# Altium footprint library RF Module.PcbLib: 29 footprints (part 2 of 2)
Each footprint in its own frame and in the unit in brackets; x right, y up, seen from the top. Pads: shape width x height; smd on the part's side, far side on the other; paste and mask are expansions set on the pad; w line width, h text height; cw(c..) or ccw(c..) is an arc to the next point about the centre after c.
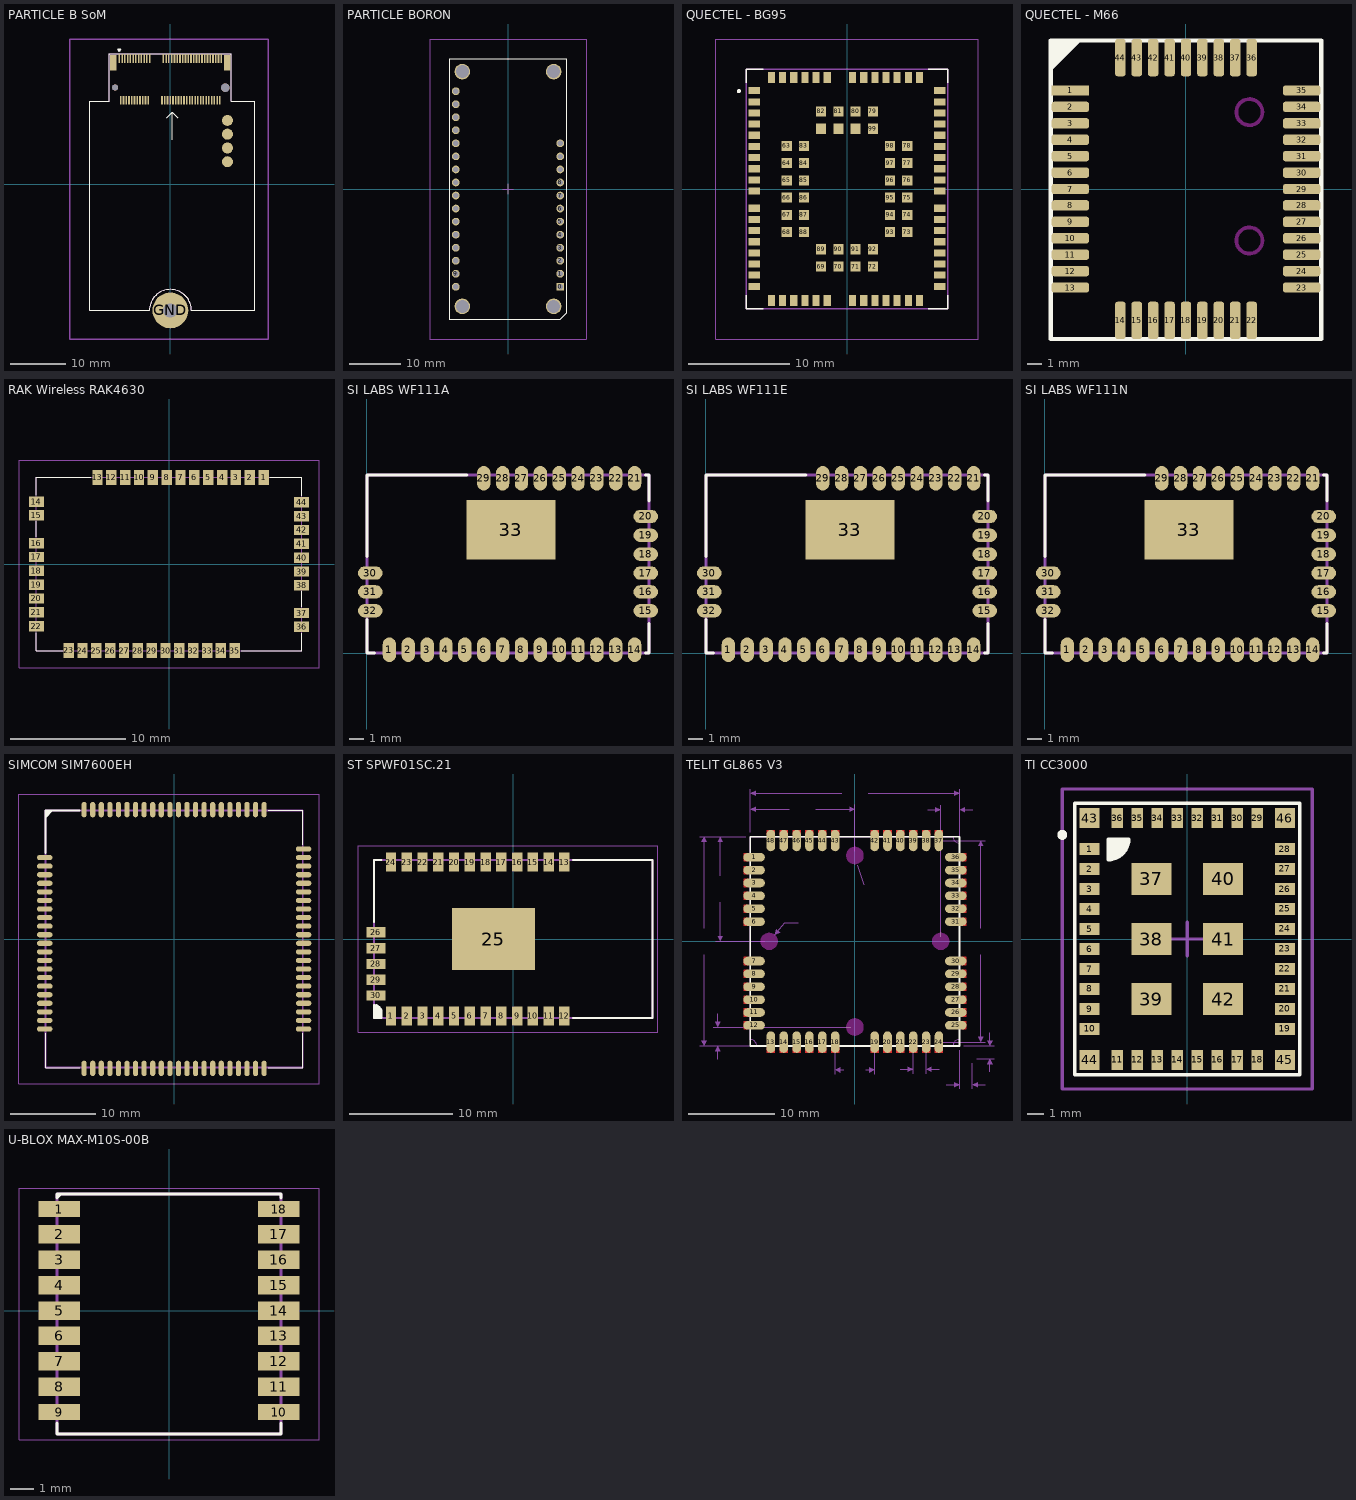
[diagram p1: the footprints below, top view; thin cyan lines are the x and y axes]

## PARTICLE B SoM [mm]
pads (76):
  rect 0.3x1.55 smd: 1(-9.26,22.867) 2(-9.01,15.317) 3(-8.76,22.867) 4(-8.51,15.317) 5(-8.26,22.867) 6(-8.01,15.317) 7(-7.76,22.867) 8(-7.51,15.317) 9(-7.26,22.867) 10(-7.01,15.317) 11(-6.76,22.867) 12(-6.51,15.317) 13(-6.26,22.867) 14(-6.01,15.317) 15(-5.76,22.867) 16(-5.51,15.317) 17(-5.26,22.867) 18(-5.01,15.317) 19(-4.76,22.867) 20(-4.51,15.317) 21(-4.26,22.867) 22(-4.01,15.317) 23(-3.76,22.867) 32(-1.51,15.317) 33(-1.26,22.867) 34(-1.01,15.317) 35(-0.76,22.867) 36(-0.51,15.317) 37(-0.26,22.867) 38(-0.01,15.317) 39(0.24,22.867) 40(0.49,15.317) 41(0.74,22.867) 42(0.99,15.317) 43(1.24,22.867) 44(1.49,15.317) 45(1.74,22.867) 46(1.99,15.317) 47(2.24,22.867) 48(2.49,15.317) 49(2.74,22.867) 50(2.99,15.317) 51(3.24,22.867) 52(3.49,15.317) 53(3.74,22.867) 54(3.99,15.317) 55(4.24,22.867) 56(4.49,15.317) 57(4.74,22.867) 58(4.99,15.317) 59(5.24,22.867) 60(5.49,15.317) 61(5.74,22.867) 62(5.99,15.317) 63(6.24,22.867) 64(6.49,15.317) 65(6.74,22.867) 66(6.99,15.317) 67(7.24,22.867) 68(7.49,15.317) 69(7.74,22.867) 70(7.99,15.317) 71(8.24,22.867) 72(8.49,15.317) 73(8.74,22.867) 74(8.99,15.317) 75(9.24,22.867)
  rect 1.2x2.75 smd: 76(10.34,22.093) 77(-10.36,22.093)
  rrect100% 2x2 smd: !RESET(10.36,11.632) SWCLK(10.36,4.132) SWDIO(10.36,6.632) SWO(10.36,9.132)
  round 6.5 hole 2.6: GND(0.009,-22.867)
  round 1.1 hole 1.1 unplated: MH1(-10.01,17.592)
  round 1.55 hole 1.55 unplated: MH2(9.99,17.592)
Top Overlay:
  lines w0.127: -0.64,12.132 0.36,13.132 ; 0.36,8.132 0.36,13.132 ; 1.36,12.132 0.36,13.132 ; -14.64,-22.867 -14.64,15.132 -11.091,15.132 -11.091,23.767 11.058,23.767 11.058,15.132 15.36,15.132 15.36,-22.867 3.819,-22.867 ccw(c0.009,-22.867) -3.801,-22.867 -14.64,-22.867
  lines w0.254: -9.589,24.561 -8.989,24.561 -9.289,24.161 -9.589,24.561
Top Paste:
  circle w0: c0.009,-22.867 r3.127
Top Component Outline:
  lines w0.127: -14.64,-22.867 -3.801,-22.867 cw(c0.009,-22.867) 3.819,-22.867 15.36,-22.867 15.36,15.132 11.058,15.132 11.058,23.764 -11.091,23.764 -11.091,15.132 -14.64,15.132 -14.64,-22.867
Top Courtyard:
  lines w0.254: -18.279,-28.048 -18.279,26.409 17.789,26.409 17.789,-28.048 -18.279,-28.048
3D body "TE 2199230-4.stp": height 4.09, standoff -0.61, extent -10.941,14.781 10.959,23.481
3D body "JAE SM3ZS067U410.step": height 3.1, standoff -0.7, extent -2.222,-25.115 2.254,-20.615

## PARTICLE BORON [mm]
pads (32):
  rect 1.5x1.5 hole 1.02: 0(10.16,-19.05)
  round 1.5 hole 1.02: 1(10.16,-16.51) 2(10.16,-13.97) 3(10.16,-11.43) 3v3(-10.16,16.51) 4(10.16,-8.89) 5(10.16,-6.35) 6(10.16,-3.81) 7(10.16,-1.27) 8(10.16,1.27) 9(-10.16,-16.51) 10(-10.16,-13.97) 11(-10.16,-11.43) 12(-10.16,-8.89) 13(-10.16,-6.35) 14(-10.16,-3.81) 15(-10.16,-1.27) 16(-10.16,1.27) 17(-10.16,3.81) 18(-10.16,6.35) 19(-10.16,8.89) 20(-10.16,13.97) EN(10.16,6.35) GND(-10.16,11.43) LiPo+(10.16,8.89) N.C.(-10.16,-19.05) RST(-10.16,19.05) VBUS(10.16,3.81)
  round 3.048 hole 2.54: ""(-8.89,-22.86) ""(-8.89,22.86) ""(8.89,-22.86) ""(8.89,22.86)
Top Overlay:
  lines w0.2: -11.43,-25.4 -11.43,25.4 11.43,25.4 11.43,-24.13 10.16,-25.4 -11.43,-25.4
Top Courtyard:
  lines w0.2: -1,0 1,0 ; 0,-1 0,1 ; -15.24,-29.21 -15.24,29.21 15.24,29.21 15.24,-29.21 -15.24,-29.21

## QUECTEL - BG95 [mm]
pads (102):
  rect 1.1x0.7 smd paste-2: 1(-9.15,9.7) 2(-9.15,8.6) 3(-9.15,7.5) 4(-9.15,6.4) 5(-9.15,5.3) 6(-9.15,4.2) 7(-9.15,3.1) 8(-9.15,2) 9(-9.15,0.9) 10(-9.15,-0.2) 11(-9.15,-1.9) 12(-9.15,-3) 13(-9.15,-4.1) 14(-9.15,-5.2) 15(-9.15,-6.3) 16(-9.15,-7.4) 17(-9.15,-8.5) 18(-9.15,-9.6) 32(9.15,-9.6) 33(9.15,-8.5) 34(9.15,-7.4) 35(9.15,-6.3) 36(9.15,-5.2) 37(9.15,-4.1) 38(9.15,-3) 39(9.15,-1.9) 40(9.15,-0.2) 41(9.15,0.9) 42(9.15,2) 43(9.15,3.1) 44(9.15,4.2) 45(9.15,5.3) 46(9.15,6.4) 47(9.15,7.5) 48(9.15,8.6) 49(9.15,9.7)
  rect 0.7x1.1 smd paste-2: 19(-7.45,-11) 20(-6.35,-11) 21(-5.25,-11) 22(-4.15,-11) 23(-3.05,-11) 24(-1.95,-11) 25(0.55,-11) 26(1.65,-11) 27(2.75,-11) 28(3.85,-11) 29(4.95,-11) 30(6.05,-11) 31(7.15,-11) 50(7.15,11) 51(6.05,11) 52(4.95,11) 53(3.85,11) 54(2.75,11) 55(1.65,11) 56(0.55,11) 57(-1.95,11) 58(-3.05,11) 59(-4.15,11) 60(-5.25,11) 61(-6.35,11) 62(-7.45,11)
  rect 1x1 smd paste-1: 63(-5.95,4.25) 64(-5.95,2.55) 65(-5.95,0.85) 66(-5.95,-0.85) 67(-5.95,-2.55) 68(-5.95,-4.25) 69(-2.55,-7.65) 70(-0.85,-7.65) 71(0.85,-7.65) 72(2.55,-7.65) 73(5.95,-4.25) 74(5.95,-2.55) 75(5.95,-0.85) 76(5.95,0.85) 77(5.95,2.55) 78(5.95,4.25) 79(2.55,7.65) 80(0.85,7.65) 81(-0.85,7.65) 82(-2.55,7.65) 83(-4.25,4.25) 84(-4.25,2.55) 85(-4.25,0.85) 86(-4.25,-0.85) 87(-4.25,-2.55) 88(-4.25,-4.25) 89(-2.55,-5.95) 90(-0.85,-5.95) 91(0.85,-5.95) 92(2.55,-5.95) 93(4.25,-4.25) 94(4.25,-2.55) 95(4.25,-0.85) 96(4.25,0.85) 97(4.25,2.55) 98(4.25,4.25) 99(2.55,5.95) 100(0.85,5.95) 101(-0.85,5.95) 102(-2.55,5.95)
Top Overlay:
  circle w0.2: c-10.67,9.66 r0.1
  lines w0.127: -9.95,-10.5 -9.95,-11.8 -8.25,-11.8 ; -9.95,10.5 -9.95,11.8 -8.25,11.8 ; 8,-11.8 9.95,-11.8 9.95,-10.5 ; 8,11.8 9.95,11.8 9.95,10.5
Top Paste:
  drawing of 102 lines, arcs and shapes, not listed
Top Component Outline:
  circle w0.2: c-10.67,9.66 r0.1
  lines w0.127: -9.95,-11.8 9.95,-11.8 9.95,11.8 -9.95,11.8 -9.95,-11.8
Top Courtyard:
  lines w0.05: -12.95,-14.8 -12.95,14.8 12.95,14.8 12.95,-14.8 -12.95,-14.8
3D body "step_temp.STEP": height 2.4, standoff 0, extent -9.95,-11.8 9.95,11.8

## QUECTEL - M66 [mm]
height 2.3
pads (44):
  rect 2.5x0.7 smd: 1(-7.75,6.6)
  rrect50% 2.5x0.7 smd: 2(-7.75,5.5) 3(-7.75,4.4) 4(-7.75,3.3) 5(-7.75,2.2) 6(-7.75,1.1) 7(-7.75,0) 8(-7.75,-1.1) 9(-7.75,-2.2) 10(-7.75,-3.3) 11(-7.75,-4.4) 12(-7.75,-5.5) 13(-7.75,-6.6) 23(7.75,-6.6) 24(7.75,-5.5) 25(7.75,-4.4) 26(7.75,-3.3) 27(7.75,-2.2) 28(7.75,-1.1) 29(7.75,0) 30(7.75,1.1) 31(7.75,2.2) 32(7.75,3.3) 33(7.75,4.4) 34(7.75,5.5) 35(7.75,6.6)
  rrect50% 0.7x2.5 smd: 14(-4.4,-8.8) 15(-3.3,-8.8) 16(-2.2,-8.8) 17(-1.1,-8.8) 18(0,-8.8) 19(1.1,-8.8) 20(2.2,-8.8) 21(3.3,-8.8) 22(4.4,-8.8) 36(4.4,8.8) 37(3.3,8.8) 38(2.2,8.8) 39(1.1,8.8) 40(0,8.8) 41(-1.1,8.8) 42(-2.2,8.8) 43(-3.3,8.8) 44(-4.4,8.8)
Top Overlay:
  region: -9.05,9.95 -9.05,7.9 -7,9.95
  lines w0.3: -9.05,-10.05 -9.05,9.95 9.05,9.95 9.05,-10.05 -9.05,-10.05 ; -9.05,7.9 -9.05,7.9
Keep-Out Layer:
  circle w0.254: c4.25,5.15 r0.875
  circle w0.254: c4.25,-3.45 r0.875
3D body "User Library-Quecte_M66.step": height 2.3, standoff 0, extent -7.9,-8.8 7.9,8.9

## RAK Wireless RAK4630 [mm] "RAK4630 Module"
height 3
pads (44):
  rect 0.9x1.3 smd: 1(8.2,7.5) 2(7,7.5) 3(5.8,7.5) 4(4.6,7.5) 5(3.4,7.5) 6(2.2,7.5) 7(1,7.5) 8(-0.2,7.5) 9(-1.4,7.5) 10(-2.6,7.5) 11(-3.8,7.5) 12(-5,7.5) 13(-6.2,7.5) 23(-8.7,-7.496) 24(-7.5,-7.5) 25(-6.3,-7.5) 26(-5.1,-7.5) 27(-3.9,-7.5) 28(-2.7,-7.5) 29(-1.5,-7.5) 30(-0.3,-7.5) 31(0.9,-7.5) 32(2.1,-7.5) 33(3.3,-7.5) 34(4.5,-7.5) 35(5.7,-7.5)
  rect 1.3x0.9 smd: 14(-11.5,5.41) 15(-11.5,4.21) 16(-11.5,1.81) 17(-11.5,0.61) 18(-11.5,-0.59) 19(-11.5,-1.79) 20(-11.5,-2.99) 21(-11.5,-4.19) 22(-11.5,-5.39) 36(11.5,-5.45) 37(11.5,-4.25) 38(11.5,-1.85) 39(11.5,-0.65) 40(11.5,0.55) 41(11.5,1.75) 42(11.5,2.95) 43(11.5,4.15) 44(11.5,5.35)
Top Overlay:
  lines w0.1: -11.5,-5.95 -11.5,-7.5 -9.225,-7.5 ; -11.5,2.375 -11.5,3.7 ; -11.5,5.975 -11.5,7.5 -6.775,7.5 ; 6.25,-7.5 11.5,-7.5 11.5,-6 ; 8.75,7.5 11.5,7.5 11.5,5.9 ; 11.5,-3.7 11.5,-2.375
Board:
  lines w0.1: -11.5,-7.5 -11.5,7.5 11.5,7.5 11.5,-7.5 -11.5,-7.5
Top Dimensions (Mech11):
  lines w0.1: -13,-9 -13,9 13,9 13,-9 -13,-9
3D body "RAK4630.stp": height 3, standoff 0, extent -11.5,-7.5 11.5,7.5

## SI LABS WF111A [mm]
height 2.1
pads (33):
  oval 0.9x1.65 smd: 1(1.515,0.225) 2(2.785,0.225) 3(4.055,0.225) 4(5.325,0.225) 5(6.595,0.225) 6(7.865,0.225) 7(9.135,0.225) 8(10.405,0.225) 9(11.675,0.225) 10(12.945,0.225) 11(14.215,0.225) 12(15.485,0.225) 13(16.755,0.225) 14(18.025,0.225) 21(18.025,11.775) 22(16.755,11.775) 23(15.485,11.775) 24(14.215,11.775) 25(12.945,11.775) 26(11.675,11.775) 27(10.405,11.775) 28(9.135,11.775) 29(7.865,11.775)
  oval 1.65x0.9 smd: 15(18.775,2.85) 16(18.775,4.12) 17(18.775,5.39) 18(18.775,6.66) 19(18.775,7.93) 20(18.775,9.2) 30(0.225,5.39) 31(0.225,4.12) 32(0.225,2.85)
  rect 6x4 smd: 33(9.7,8.3)
Top Overlay:
  lines w0.2: 0,2.25 0,0 0.5,0 ; 0,6.5 0,12 6.75,12 ; 18.75,0 19,0 19,2 ; 18.75,12 19,12 19,10.25
Board:
  lines w0.2: 0,0 0,12 19,12 19,0 0,0
3D body "WF111A.STEP": height 2.1, standoff 0, extent 0,0 19,12

## SI LABS WF111E [mm]
height 2.1
pads (33):
  oval 0.9x1.65 smd: 1(1.515,0.225) 2(2.785,0.225) 3(4.055,0.225) 4(5.325,0.225) 5(6.595,0.225) 6(7.865,0.225) 7(9.135,0.225) 8(10.405,0.225) 9(11.675,0.225) 10(12.945,0.225) 11(14.215,0.225) 12(15.485,0.225) 13(16.755,0.225) 14(18.025,0.225) 21(18.025,11.775) 22(16.755,11.775) 23(15.485,11.775) 24(14.215,11.775) 25(12.945,11.775) 26(11.675,11.775) 27(10.405,11.775) 28(9.135,11.775) 29(7.865,11.775)
  oval 1.65x0.9 smd: 15(18.775,2.85) 16(18.775,4.12) 17(18.775,5.39) 18(18.775,6.66) 19(18.775,7.93) 20(18.775,9.2) 30(0.225,5.39) 31(0.225,4.12) 32(0.225,2.85)
  rect 6x4 smd: 33(9.7,8.3)
Top Overlay:
  lines w0.2: 0,2.25 0,0 0.5,0 ; 0,6.5 0,12 6.75,12 ; 18.75,0 19,0 19,2 ; 18.75,12 19,12 19,10.25
Board:
  lines w0.2: 0,0 19,0 19,12 0,12 0,0
3D body "WF111E.STEP": height 2.2, standoff 0, extent 0,0 19,12

## SI LABS WF111N [mm]
height 2.1
pads (33):
  oval 0.9x1.65 smd: 1(1.515,0.225) 2(2.785,0.225) 3(4.055,0.225) 4(5.325,0.225) 5(6.595,0.225) 6(7.865,0.225) 7(9.135,0.225) 8(10.405,0.225) 9(11.675,0.225) 10(12.945,0.225) 11(14.215,0.225) 12(15.485,0.225) 13(16.755,0.225) 14(18.025,0.225) 21(18.025,11.775) 22(16.755,11.775) 23(15.485,11.775) 24(14.215,11.775) 25(12.945,11.775) 26(11.675,11.775) 27(10.405,11.775) 28(9.135,11.775) 29(7.865,11.775)
  oval 1.65x0.9 smd: 15(18.775,2.85) 16(18.775,4.12) 17(18.775,5.39) 18(18.775,6.66) 19(18.775,7.93) 20(18.775,9.2) 30(0.225,5.39) 31(0.225,4.12) 32(0.225,2.85)
  rect 6x4 smd: 33(9.7,8.3)
Top Overlay:
  lines w0.2: 0,2.25 0,0 0.5,0 ; 0,6.5 0,12 6.75,12 ; 18.75,0 19,0 19,2 ; 18.75,12 19,12 19,10.25
Board:
  lines w0.2: 0,0 0,12 19,12 19,0 0,0
3D body "WF111N.STEP": height 2.1, standoff 0, extent 0,0 19,12

## SIMCOM SIM7600EH [mm]
pads (87):
  rrect100% 1.8x0.6 smd: 1(-15.1,9.5) 2(-15.1,8.5) 3(-15.1,7.5) 4(-15.1,6.5) 5(-15.1,5.5) 6(-15.1,4.5) 7(-15.1,3.5) 8(-15.1,2.5) 9(-15.1,1.5) 10(-15.1,0.5) 11(-15.1,-0.5) 12(-15.1,-1.5) 13(-15.1,-2.5) 14(-15.1,-3.5) 15(-15.1,-4.5) 16(-15.1,-5.5) 17(-15.1,-6.5) 18(-15.1,-7.5) 19(-15.1,-8.5) 20(-15.1,-9.5) 41(15.1,-9.5) 42(15.1,-8.5) 43(15.1,-7.5) 44(15.1,-6.5) 45(15.1,-5.5) 46(15.1,-4.5) 47(15.1,-3.5) 48(15.1,-2.5) 49(15.1,-1.5) 50(15.1,-0.5) 51(15.1,0.5) 52(15.1,1.5) 53(15.1,2.5) 54(15.1,3.5) 55(15.1,4.5) 56(15.1,5.5) 57(15.1,6.5) 58(15.1,7.5) 59(15.1,8.5) 60(15.1,9.5) 81(-15.1,-10.5) 82(15.1,-10.5) 85(15.1,10.5)
  rrect100% 0.6x1.8 smd: 21(-9.5,-15.1) 22(-8.5,-15.1) 23(-7.5,-15.1) 24(-6.5,-15.1) 25(-5.5,-15.1) 26(-4.5,-15.1) 27(-3.5,-15.1) 28(-2.5,-15.1) 29(-1.5,-15.1) 30(-0.5,-15.1) 31(0.5,-15.1) 32(1.5,-15.1) 33(2.5,-15.1) 34(3.5,-15.1) 35(4.5,-15.1) 36(5.5,-15.1) 37(6.5,-15.1) 38(7.5,-15.1) 39(8.5,-15.1) 40(9.5,-15.1) 61(9.5,15.1) 62(8.5,15.1) 63(7.5,15.1) 64(6.5,15.1) 65(5.5,15.1) 66(4.5,15.1) 67(3.5,15.1) 68(2.5,15.1) 69(1.5,15.1) 70(0.5,15.1) 71(-0.5,15.1) 72(-1.5,15.1) 73(-2.5,15.1) 74(-3.5,15.1) 75(-4.5,15.1) 76(-5.5,15.1) 77(-6.5,15.1) 78(-7.5,15.1) 79(-8.5,15.1) 80(-9.5,15.1) 83(10.5,-15.1) 84(-10.5,-15.1) 86(-10.5,15.1) 87(10.5,15.1)
Top Overlay:
  lines w0.1: -15,-11 -15,-15 -11,-15 ; 11,-15 15,-15 15,-11 ; 11,15 15,15 15,11
  lines w0.2: -15,10 -15,15 -11,15 ; -15,14.224 -14.224,15 ; -15,14.35 -14.35,15 ; -15,14.5 -14.5,15 ; -15,14.7 -14.7,15 -15,14.725
Top Component Outline:
  lines w0.2: -15,-15 15,-15 15,15 -15,15 -15,-15
Top Courtyard:
  lines w0.1: -18.1,-16.9 16.9,-16.9 16.9,16.9 -18.1,16.9 -18.1,-16.9
3D body "SIM7600EH.stp": height 2.92, standoff 0.02, extent -15,-15 15,15

## ST SPWF01SC.21 [mm] "Serial to WiFi b/g/n intelligent modules"
height 2.35
pads (30):
  rect 1x1.85 smd: 1(-11.811,-7.435) 2(-10.287,-7.435) 3(-8.763,-7.435) 4(-7.239,-7.435) 5(-5.715,-7.435) 6(-4.191,-7.435) 7(-2.667,-7.435) 8(-1.143,-7.435) 9(0.381,-7.435) 10(1.905,-7.435) 11(3.429,-7.435) 12(4.953,-7.435) 13(4.953,7.435) 14(3.429,7.435) 15(1.905,7.435) 16(0.381,7.435) 17(-1.143,7.435) 18(-2.667,7.435) 19(-4.191,7.435) 20(-5.715,7.435) 21(-7.239,7.435) 22(-8.763,7.435) 23(-10.287,7.435) 24(-11.811,7.435)
  rect 8x6 smd: 25(-1.911,0)
  rect 1.85x1 smd: 26(-13.277,0.636) 27(-13.277,-0.888) 28(-13.277,-2.412) 29(-13.277,-3.936) 30(-13.277,-5.46)
Top Overlay:
  region: -13.462,-7.62 -13.462,-6.37 -13.13,-6.37 -12.712,-6.788 -12.712,-7.62
  lines w0.2: -13.462,1.63 -13.462,7.62 -12.712,7.62 ; 5.788,-7.62 13.462,-7.62 13.462,7.62 5.788,7.62 ; -13.462,-7.62 -13.462,-6.37 cw(c-13.462,-7.12) -12.712,-7.12 -12.712,-7.62 -13.462,-7.62
Board:
  lines w0.2: -13.462,-7.62 -13.462,7.62 13.462,7.62 13.462,-7.62 -13.462,-7.62
Top Courtyard:
  lines w0.1: -1,0 1,0 ; 0,-1 0,1 ; -15,-9 14,-9 14,9 -15,9 -15,-9
3D body "SPWF01SC.21.STEP": height 2.6, standoff -0.03, extent -13.462,-7.62 13.462,7.62

## TELIT GL865 V3 [mm] "Telit GL865 Gsm/GPRS Module"
height 2.6
pads (48):
  oval 2.5x1 smd paste+0 mask+0.05: 1(-11.75,9.8) 2(-11.75,8.3) 3(-11.75,6.8) 4(-11.75,5.3) 5(-11.75,3.8) 6(-11.75,2.3) 7(-11.75,-2.3) 8(-11.75,-3.8) 9(-11.75,-5.3) 10(-11.75,-6.8) 11(-11.75,-8.3) 12(-11.75,-9.8) 25(11.75,-9.8) 26(11.75,-8.3) 27(11.75,-6.8) 28(11.75,-5.3) 29(11.75,-3.8) 30(11.75,-2.3) 31(11.75,2.3) 32(11.75,3.8) 33(11.75,5.3) 34(11.75,6.8) 35(11.75,8.3) 36(11.75,9.8)
  oval 1x2.5 smd paste+0 mask+0.05: 13(-9.8,-11.75) 14(-8.3,-11.75) 15(-6.8,-11.75) 16(-5.3,-11.75) 17(-3.8,-11.75) 18(-2.3,-11.75) 19(2.3,-11.75) 20(3.8,-11.75) 21(5.3,-11.75) 22(6.8,-11.75) 23(8.3,-11.75) 24(9.8,-11.75) 37(9.8,11.75) 38(8.3,11.75) 39(6.8,11.75) 40(5.3,11.75) 41(3.8,11.75) 42(2.3,11.75) 43(-2.3,11.75) 44(-3.8,11.75) 45(-5.3,11.75) 46(-6.8,11.75) 47(-8.3,11.75) 48(-9.8,11.75)
Top Layer:
  rectangle: 1.8,-13 2.8,-12.375
  rectangle: 4.8,-13 5.8,-12.375
  rectangle: 7.8,-13 8.8,-12.375
  rectangle: 9.3,-13 10.3,-12.375
  rectangle: 6.3,-13 7.3,-12.375
  rectangle: 3.3,-13 4.3,-12.375
  rectangle: -10.3,-13 -9.3,-12.375
  rectangle: -7.3,-13 -6.3,-12.375
  rectangle: -4.3,-13 -3.3,-12.375
  rectangle: -2.8,-13 -1.8,-12.375
  rectangle: -5.8,-13 -4.8,-12.375
  rectangle: -8.8,-13 -7.8,-12.375
  rectangle: 1.8,12.375 2.8,13
  rectangle: 4.8,12.375 5.8,13
  rectangle: 7.8,12.375 8.8,13
  rectangle: 9.3,12.375 10.3,13
  rectangle: 6.3,12.375 7.3,13
  rectangle: 3.3,12.375 4.3,13
  rectangle: -8.8,12.375 -7.8,13
  rectangle: -5.8,12.375 -4.8,13
  rectangle: -2.8,12.375 -1.8,13
  rectangle: -4.3,12.375 -3.3,13
  rectangle: -7.3,12.375 -6.3,13
  rectangle: -10.3,12.375 -9.3,13
  rectangle: 12.5,-2.8 13,-1.8
  rectangle: 12.5,-4.3 13,-3.3
  rectangle: 12.5,-7.3 13,-6.3
  rectangle: 12.5,-5.8 13,-4.8
  rectangle: 12.5,-10.3 13,-9.3
  rectangle: 12.5,-8.8 13,-7.8
  rectangle: 12.5,9.3 13,10.3
  rectangle: 12.5,7.8 13,8.8
  rectangle: 12.5,4.8 13,5.8
  rectangle: 12.5,6.3 13,7.3
  rectangle: 12.5,1.8 13,2.8
  rectangle: 12.5,3.3 13,4.3
  rectangle: -13,-2.8 -12.5,-1.8
  rectangle: -13,-4.3 -12.5,-3.3
  rectangle: -13,-7.3 -12.5,-6.3
  rectangle: -13,-5.8 -12.5,-4.8
  rectangle: -13,-10.3 -12.5,-9.3
  rectangle: -13,-8.8 -12.5,-7.8
  rectangle: -13,3.3 -12.5,4.3
  rectangle: -13,1.8 -12.5,2.8
  rectangle: -13,6.3 -12.5,7.3
  rectangle: -13,4.8 -12.5,5.8
  rectangle: -13,7.8 -12.5,8.8
  rectangle: -13,9.3 -12.5,10.3
Top Layer keep-out:
  region: -9,0 -9,0.098 -9.038,0.292 -9.114,0.474 -9.223,0.637 -9.363,0.777 -9.526,0.886 -9.708,0.962 -9.902,1 -10,1 -10.098,1 -10.292,0.962 -10.474,0.886 -10.637,0.777 -10.777,0.637 -10.886,0.474 -10.962,0.292 -11,0.098 -11,0 -11,-0.098 -10.962,-0.292 -10.886,-0.474 -10.777,-0.637 -10.637,-0.777 -10.474,-0.886 -10.292,-0.962 -10.098,-1 -10,-1 -9.902,-1 -9.708,-0.962 -9.526,-0.886 -9.363,-0.777 -9.223,-0.637 -9.114,-0.474 -9.038,-0.292 -9,-0.098
  region: 1,-10 1,-9.902 0.962,-9.708 0.886,-9.526 0.777,-9.363 0.637,-9.223 0.474,-9.114 0.292,-9.038 0.098,-9 0,-9 -0.098,-9 -0.292,-9.038 -0.474,-9.114 -0.637,-9.223 -0.777,-9.363 -0.886,-9.526 -0.962,-9.708 -1,-9.902 -1,-10 -1,-10.098 -0.962,-10.292 -0.886,-10.474 -0.777,-10.637 -0.637,-10.777 -0.474,-10.886 -0.292,-10.962 -0.098,-11 0,-11 0.098,-11 0.292,-10.962 0.474,-10.886 0.637,-10.777 0.777,-10.637 0.886,-10.474 0.962,-10.292 1,-10.098
  region: 11,0 11,0.098 10.962,0.292 10.886,0.474 10.777,0.637 10.637,0.777 10.474,0.886 10.292,0.962 10.098,1 10,1 9.902,1 9.708,0.962 9.526,0.886 9.363,0.777 9.223,0.637 9.114,0.474 9.038,0.292 9,0.098 9,0 9,-0.098 9.038,-0.292 9.114,-0.474 9.223,-0.637 9.363,-0.777 9.526,-0.886 9.708,-0.962 9.902,-1 10,-1 10.098,-1 10.292,-0.962 10.474,-0.886 10.637,-0.777 10.777,-0.637 10.886,-0.474 10.962,-0.292 11,-0.098
  region: 1,10 1,10.098 0.962,10.292 0.886,10.474 0.777,10.637 0.637,10.777 0.474,10.886 0.292,10.962 0.098,11 0,11 -0.098,11 -0.292,10.962 -0.474,10.886 -0.637,10.777 -0.777,10.637 -0.886,10.474 -0.962,10.292 -1,10.098 -1,10 -1,9.902 -0.962,9.708 -0.886,9.526 -0.777,9.363 -0.637,9.223 -0.474,9.114 -0.292,9.038 -0.098,9 0,9 0.098,9 0.292,9.038 0.474,9.114 0.637,9.223 0.777,9.363 0.886,9.526 0.962,9.708 1,9.902
Top Overlay:
  lines w0.2: -12.2,-12.2 -12.2,12.2 12.2,12.2 12.2,-12.2 -12.2,-12.2
  text ".Designator" at -7.649,1.856 h1.5
Board:
  lines w0.1: -12.2,-11.45 cw(c-12.2,-12.2) -11.45,-12.2 11.45,-12.2 cw(c12.2,-12.2) 12.2,-11.45 12.2,11.45 cw(c12.2,12.2) 11.45,12.2 -12.2,12.2 -12.2,-11.45
  text ".Designator" at -7.649,-0.684 h1.5
Mechanical 4:
  region: 14.682,-11.75 14.377,-11.14 14.987,-11.14
  region: 14.682,11.75 14.987,11.14 14.377,11.14
  region: 15.74,-13.7 16.045,-14.31 15.435,-14.31
  region: 15.74,-12.2 15.435,-11.59 16.045,-11.59
  region: 13.7,-16.712 14.31,-16.407 14.31,-17.017
  region: 12.2,-16.712 11.59,-17.017 11.59,-16.407
  region: 8.3,-14.918 8.91,-14.613 8.91,-15.223
  region: 6.8,-14.918 6.19,-15.223 6.19,-14.613
  region: 2.3,-14.992 1.69,-15.297 1.69,-14.687
  region: -2.3,-14.992 -1.69,-14.687 -1.69,-15.297
  region: -9.348,0.758 -9.181,1.419 -8.719,1.022
  region: 12.2,15.341 12.81,15.646 12.81,15.036
  region: 10,15.341 9.39,15.036 9.39,15.646
  region: 12.2,17.25 11.59,16.945 11.59,17.555
  region: -12.2,17.25 -11.59,17.555 -11.59,16.945
  region: 0,15.406 -0.61,15.101 -0.61,15.711
  region: -12.2,15.406 -11.59,15.711 -11.59,15.101
  region: -15.711,0 -16.016,0.61 -15.406,0.61
  region: -15.711,12.2 -15.406,11.59 -16.016,11.59
  region: -15.986,-12.2 -15.681,-12.81 -16.291,-12.81
  region: -15.986,-10 -16.291,-9.39 -15.681,-9.39
  region: -17.584,-12.2 -17.889,-11.59 -17.279,-11.59
  region: -17.584,12.2 -17.279,11.59 -17.889,11.59
  lines w0: -18.092,-12.2 -11.958,-12.2 ; -18.092,12.2 -12.708,12.2 -16.219,12.2 ; -17.584,-11.895 -17.584,-1.544 ; -17.584,1.544 -17.584,11.895 ; -16.494,-12.2 -12.708,-12.2 ; -16.494,-10 -0.508,-10 ; -16.219,0 -10.508,0 ; -15.986,-13.725 -15.986,-12.505 ; -15.986,-9.695 -15.986,-8.475 ; -15.711,0.305 -15.711,4.565 ; -15.711,7.635 -15.711,11.895 ; -12.2,15.914 -12.2,12.708 -12.2,17.758 ; -11.895,15.406 -7.635,15.406 ; -11.895,17.25 -1.544,17.25 ; -9.348,0.758 -8.154,2.145 -6.63,2.145 ; -4.565,15.406 -0.305,15.406 ; -2.3,-15.5 -2.3,-12.258 ; -1.995,-14.992 -1.292,-14.992 ; 0,10.508 0,15.914 ; 1.292,-14.992 1.995,-14.992 ; 1.544,17.25 11.895,17.25 ; 2.3,-15.5 2.3,-12.258 ; 5.275,-14.918 6.495,-14.918 ; 6.8,-15.426 6.8,-12.258 ; 8.3,-15.426 8.3,-12.258 ; 8.475,15.341 9.695,15.341 ; 8.605,-14.918 9.825,-14.918 ; 10,0.508 10,15.849 ; 10.308,-11.75 15.19,-11.75 ; 10.308,11.75 15.19,11.75 ; 10.675,-16.712 11.895,-16.712 ; 12.2,-17.22 12.2,-12.708 ; 12.2,11.958 12.2,17.758 ; 12.2,12.708 12.2,15.849 ; 12.505,15.341 13.725,15.341 ; 12.708,-12.2 16.248,-12.2 ; 13.7,-17.22 13.7,-14.208 ; 14.005,-16.712 15.225,-16.712 ; 14.208,-13.7 16.248,-13.7 ; 14.682,-11.445 14.682,-1.544 ; 14.682,1.544 14.682,11.445 ; 15.74,-15.225 15.74,-14.005 ; 15.74,-11.895 15.74,-10.675
  lines w0.1: 0.254,8.89 1.016,6.604
  text "2.2mm" at 5.989,15.087 h0.51
  text "24.4mm" at -1.433,16.996 h0.51
  text "12.2mm" at -7.533,15.152 h0.51
  text "12.2mm" at -15.457,5.616 h0.51
  text "2.2mm" at -15.732,-7.667 h0.51
  text "24.4mm" at -17.33,-0.484 h0.51
  text "D2mm" at -6.498,1.891 h0.51
  text "4.6mm" at -1.194,-15.246 h0.51
  text "1.5mm" at 2.799,-15.172 h0.51
  text "1.5mm" at 8.199,-16.966 h0.51
  text "1.5mm" at 15.994,-9.877 h0.51
  text "23.5mm" at 14.936,-0.484 h0.51
  text "Wiring inhibit" at -9.12,5.596 h1
3D body "Telit GL865.step": height 2.7, standoff -0.01, extent -12.21,-12.21 12.21,12.21

## TI CC3000 [mm]
height 2.2
pads (46):
  rect 1.2x0.7 smd: 1(-5.85,5.4) 2(-5.85,4.2) 3(-5.85,3) 4(-5.85,1.8) 5(-5.85,0.6) 6(-5.85,-0.6) 7(-5.85,-1.8) 8(-5.85,-3) 9(-5.85,-4.2) 10(-5.85,-5.4) 19(5.85,-5.4) 20(5.85,-4.2) 21(5.85,-3) 22(5.85,-1.8) 23(5.85,-0.6) 24(5.85,0.6) 25(5.85,1.8) 26(5.85,3) 27(5.85,4.2) 28(5.85,5.4)
  rect 0.7x1.2 smd: 11(-4.2,-7.25) 12(-3,-7.25) 13(-1.8,-7.25) 14(-0.6,-7.25) 15(0.6,-7.25) 16(1.8,-7.25) 17(3,-7.25) 18(4.2,-7.25) 29(4.2,7.25) 30(3,7.25) 31(1.8,7.25) 32(0.6,7.25) 33(-0.6,7.25) 34(-1.8,7.25) 35(-3,7.25) 36(-4.2,7.25)
  rect 2.4x1.9 smd: 37(-2.15,3.6) 38(-2.15,0) 39(-2.15,-3.6) 40(2.15,3.6) 41(2.15,0) 42(2.15,-3.6)
  rect 1.2x1.2 smd: 43(-5.85,7.25) 44(-5.85,-7.25) 45(5.85,-7.25) 46(5.85,7.25)
Top Overlay:
  circle w0.3: c-7.5,6.25 r0.15
  region: -4.75,6 -4.75,4.75 -4.25,4.75 -3.5,5.5 -3.5,6
  lines w0.2: -6.75,-8.15 6.75,-8.15 6.75,8.15 -6.75,8.15 -6.75,-8.15 ; -4.75,4.75 ccw(c-4.75,6) -3.5,6 -4.75,6 -4.75,4.75
Top Courtyard:
  lines w0.2: -1,0 1,0 ; 0,-1 0,1 ; -7.5,-9 -7.5,9 7.5,9 7.5,-9 -7.5,-9
3D body "TI CC3000MOD.STEP": height 2.1, standoff 0, extent -6.75,-8.15 6.75,8.15

## U-BLOX MAX-M10S-00B [mm]
height 2.7
pads (18):
  rect 1.8x0.7 smd paste-2: 1(-4.75,4.4) 9(-4.75,-4.4) 10(4.75,-4.4) 18(4.75,4.4)
  rect 1.8x0.8 smd paste-2: 2(-4.75,3.3) 3(-4.75,2.2) 4(-4.75,1.1) 5(-4.75,0) 6(-4.75,-1.1) 7(-4.75,-2.2) 8(-4.75,-3.3) 11(4.75,-3.3) 12(4.75,-2.2) 13(4.75,-1.1) 14(4.75,0) 15(4.75,1.1) 16(4.75,2.2) 17(4.75,3.3)
Top Overlay:
  lines w0.127: -4.85,-4.875 -4.85,-5.35 4.85,-5.35 4.85,-4.875 ; -4.675,5.05 -4.85,4.875 -4.85,5.05 4.85,5.05 4.85,4.875
Top Paste:
  region: -4.85,0.3 -3.95,0.3 -3.95,-0.3 -4.85,-0.3 -4.85,-0.4 -6.25,-0.4 -6.25,0.4 -4.85,0.4
  region: -4.85,4.65 -3.95,4.65 -3.95,4.15 -4.85,4.15 -4.85,4.05 -6.25,4.05 -6.25,4.75 -4.85,4.75
  region: 6.25,4.05 4.85,4.05 4.85,4.15 3.95,4.15 3.95,4.65 4.85,4.65 4.85,4.75 6.25,4.75
  region: -4.85,3.6 -3.95,3.6 -3.95,3 -4.85,3 -4.85,2.9 -6.25,2.9 -6.25,3.7 -4.85,3.7
  region: -4.85,2.5 -3.95,2.5 -3.95,1.9 -4.85,1.9 -4.85,1.8 -6.25,1.8 -6.25,2.6 -4.85,2.6
  region: -4.85,1.4 -3.95,1.4 -3.95,0.8 -4.85,0.8 -4.85,0.7 -6.25,0.7 -6.25,1.5 -4.85,1.5
  region: -4.85,-0.8 -3.95,-0.8 -3.95,-1.4 -4.85,-1.4 -4.85,-1.5 -6.25,-1.5 -6.25,-0.7 -4.85,-0.7
  region: -4.85,-1.9 -3.95,-1.9 -3.95,-2.5 -4.85,-2.5 -4.85,-2.6 -6.25,-2.6 -6.25,-1.8 -4.85,-1.8
  region: -4.85,-3 -3.95,-3 -3.95,-3.6 -4.85,-3.6 -4.85,-3.7 -6.25,-3.7 -6.25,-2.9 -4.85,-2.9
  region: 6.25,-0.4 4.85,-0.4 4.85,-0.3 3.95,-0.3 3.95,0.3 4.85,0.3 4.85,0.4 6.25,0.4
  region: 6.25,2.9 4.85,2.9 4.85,3 3.95,3 3.95,3.6 4.85,3.6 4.85,3.7 6.25,3.7
  region: 6.25,1.8 4.85,1.8 4.85,1.9 3.95,1.9 3.95,2.5 4.85,2.5 4.85,2.6 6.25,2.6
  region: 6.25,0.7 4.85,0.7 4.85,0.8 3.95,0.8 3.95,1.4 4.85,1.4 4.85,1.5 6.25,1.5
  region: 6.25,-1.5 4.85,-1.5 4.85,-1.4 3.95,-1.4 3.95,-0.8 4.85,-0.8 4.85,-0.7 6.25,-0.7
  region: 6.25,-2.6 4.85,-2.6 4.85,-2.5 3.95,-2.5 3.95,-1.9 4.85,-1.9 4.85,-1.8 6.25,-1.8
  region: 6.25,-3.7 4.85,-3.7 4.85,-3.6 3.95,-3.6 3.95,-3 4.85,-3 4.85,-2.9 6.25,-2.9
  region: -4.85,-4.15 -3.95,-4.15 -3.95,-4.65 -4.85,-4.65 -4.85,-4.75 -6.25,-4.75 -6.25,-4.05 -4.85,-4.05
  region: 6.25,-4.75 4.85,-4.75 4.85,-4.65 3.95,-4.65 3.95,-4.15 4.85,-4.15 4.85,-4.05 6.25,-4.05
Top Component Outline:
  lines w0.127: -4.85,-5.35 4.85,-5.35 4.85,5.05 -4.85,5.05 -4.85,-5.35
Top Courtyard:
  lines w0.05: -6.5,-5.6 6.5,-5.6 6.5,5.3 -6.5,5.3 -6.5,-5.6
3D body "step_temp.STEP": height 2.7, standoff 0, extent -4.85,-5.35 4.85,5.05